# Altium footprint library IC_SMD_QUAD.PcbLib: 112 footprints (part 2 of 7)
Each footprint in its own frame and in the unit in brackets; x right, y up, seen from the top. Pads: shape width x height; smd on the part's side, far side on the other; paste and mask are expansions set on the pad; w line width, h text height; cw(c..) or ccw(c..) is an arc to the next point about the centre after c.
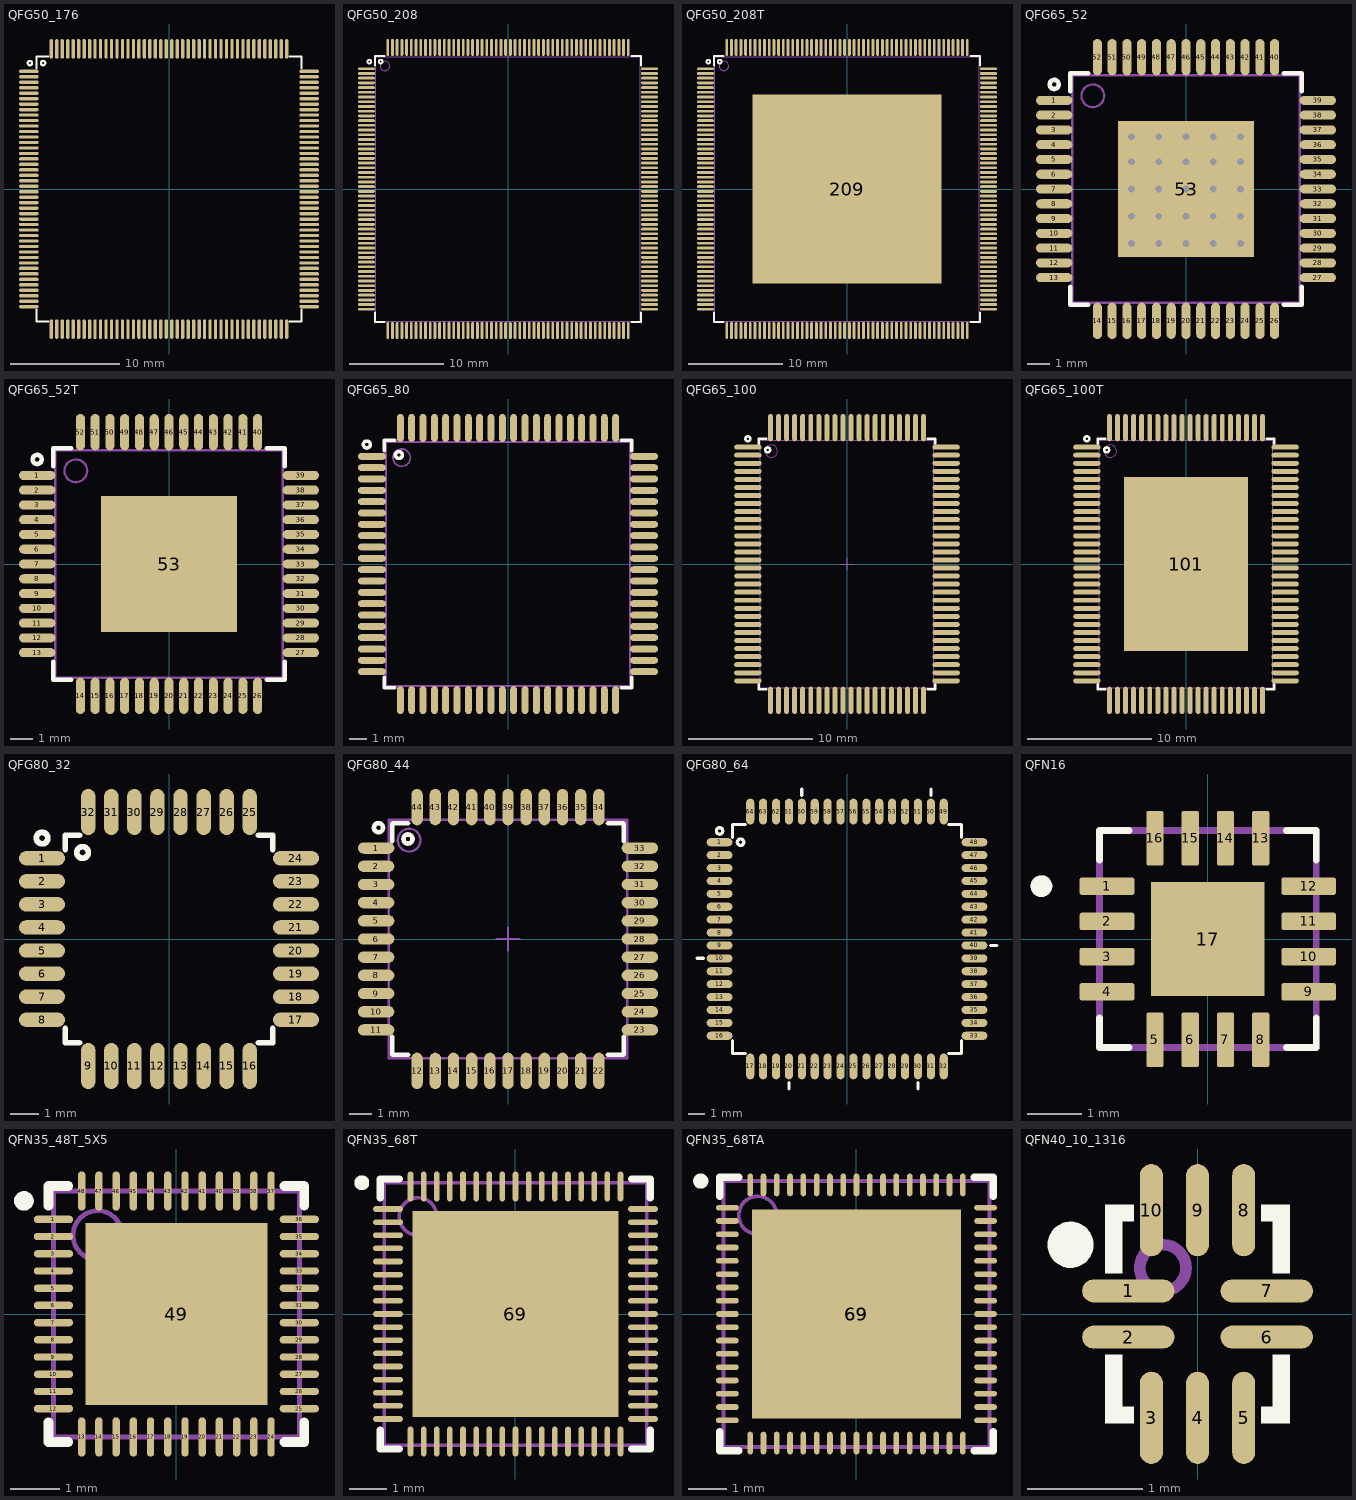
[diagram p1: the footprints below, top view; thin cyan lines are the x and y axes]

## QFG50_176 [mm] "PQFP176, HT176/TQ176 (Xilinx), 24X24mm, Pitch: 0.5mm, HTG176"
pads (176):
  oval 1.8x0.3 smd mask+0.075: 1(-12.8,10.75) 2(-12.8,10.25) 3(-12.8,9.75) 4(-12.8,9.25) 5(-12.8,8.75) 6(-12.8,8.25) 7(-12.8,7.75) 8(-12.8,7.25) 9(-12.8,6.75) 10(-12.8,6.25) 11(-12.8,5.75) 12(-12.8,5.25) 13(-12.8,4.75) 14(-12.8,4.25) 15(-12.8,3.75) 16(-12.8,3.25) 17(-12.8,2.75) 18(-12.8,2.25) 19(-12.8,1.75) 20(-12.8,1.25) 21(-12.8,0.75) 22(-12.8,0.25) 23(-12.8,-0.25) 24(-12.8,-0.75) 25(-12.8,-1.25) 26(-12.8,-1.75) 27(-12.8,-2.25) 28(-12.8,-2.75) 29(-12.8,-3.25) 30(-12.8,-3.75) 31(-12.8,-4.25) 32(-12.8,-4.75) 33(-12.8,-5.25) 34(-12.8,-5.75) 35(-12.8,-6.25) 36(-12.8,-6.75) 37(-12.8,-7.25) 38(-12.8,-7.75) 39(-12.8,-8.25) 40(-12.8,-8.75) 41(-12.8,-9.25) 42(-12.8,-9.75) 43(-12.8,-10.25) 44(-12.8,-10.75) 89(12.8,-10.75) 90(12.8,-10.25) 91(12.8,-9.75) 92(12.8,-9.25) 93(12.8,-8.75) 94(12.8,-8.25) 95(12.8,-7.75) 96(12.8,-7.25) 97(12.8,-6.75) 98(12.8,-6.25) 99(12.8,-5.75) 100(12.8,-5.25) 101(12.8,-4.75) 102(12.8,-4.25) 103(12.8,-3.75) 104(12.8,-3.25) 105(12.8,-2.75) 106(12.8,-2.25) 107(12.8,-1.75) 108(12.8,-1.25) 109(12.8,-0.75) 110(12.8,-0.25) 111(12.8,0.25) 112(12.8,0.75) 113(12.8,1.25) 114(12.8,1.75) 115(12.8,2.25) 116(12.8,2.75) 117(12.8,3.25) 118(12.8,3.75) 119(12.8,4.25) 120(12.8,4.75) 121(12.8,5.25) 122(12.8,5.75) 123(12.8,6.25) 124(12.8,6.75) 125(12.8,7.25) 126(12.8,7.75) 127(12.8,8.25) 128(12.8,8.75) 129(12.8,9.25) 130(12.8,9.75) 131(12.8,10.25) 132(12.8,10.75)
  oval 0.3x1.8 smd mask+0.075: 45(-10.75,-12.8) 46(-10.25,-12.8) 47(-9.75,-12.8) 48(-9.25,-12.8) 49(-8.75,-12.8) 50(-8.25,-12.8) 51(-7.75,-12.8) 52(-7.25,-12.8) 53(-6.75,-12.8) 54(-6.25,-12.8) 55(-5.75,-12.8) 56(-5.25,-12.8) 57(-4.75,-12.8) 58(-4.25,-12.8) 59(-3.75,-12.8) 60(-3.25,-12.8) 61(-2.75,-12.8) 62(-2.25,-12.8) 63(-1.75,-12.8) 64(-1.25,-12.8) 65(-0.75,-12.8) 66(-0.25,-12.8) 67(0.25,-12.8) 68(0.75,-12.8) 69(1.25,-12.8) 70(1.75,-12.8) 71(2.25,-12.8) 72(2.75,-12.8) 73(3.25,-12.8) 74(3.75,-12.8) 75(4.25,-12.8) 76(4.75,-12.8) 77(5.25,-12.8) 78(5.75,-12.8) 79(6.25,-12.8) 80(6.75,-12.8) 81(7.25,-12.8) 82(7.75,-12.8) 83(8.25,-12.8) 84(8.75,-12.8) 85(9.25,-12.8) 86(9.75,-12.8) 87(10.25,-12.8) 88(10.75,-12.8) 133(10.75,12.8) 134(10.25,12.8) 135(9.75,12.8) 136(9.25,12.8) 137(8.75,12.8) 138(8.25,12.8) 139(7.75,12.8) 140(7.25,12.8) 141(6.75,12.8) 142(6.25,12.8) 143(5.75,12.8) 144(5.25,12.8) 145(4.75,12.8) 146(4.25,12.8) 147(3.75,12.8) 148(3.25,12.8) 149(2.75,12.8) 150(2.25,12.8) 151(1.75,12.8) 152(1.25,12.8) 153(0.75,12.8) 154(0.25,12.8) 155(-0.25,12.8) 156(-0.75,12.8) 157(-1.25,12.8) 158(-1.75,12.8) 159(-2.25,12.8) 160(-2.75,12.8) 161(-3.25,12.8) 162(-3.75,12.8) 163(-4.25,12.8) 164(-4.75,12.8) 165(-5.25,12.8) 166(-5.75,12.8) 167(-6.25,12.8) 168(-6.75,12.8) 169(-7.25,12.8) 170(-7.75,12.8) 171(-8.25,12.8) 172(-8.75,12.8) 173(-9.25,12.8) 174(-9.75,12.8) 175(-10.25,12.8) 176(-10.75,12.8)
Top Overlay:
  circle w0.2: c-12.7,11.5 r0.2
  circle w0.2: c-11.5,11.5 r0.2
  lines w0.2: -12.1,-11 -12.1,-12.1 -11,-12.1 ; -12.1,11 -12.1,12.1 -11,12.1 ; 11,-12.1 12.1,-12.1 12.1,-11 ; 11,12.1 12.1,12.1 12.1,11
Top Designator:
  text ".Designator" at -3.71,-0.344 h1.52
3D body "User Library-pqfp-176-0_5.step": height 1.6, standoff 0, extent -13.1,-13.119 13.1,13.081

## QFG50_208 [mm] "LQFP208, pqfp208 (Altera), N208 (Cypress), HQ208/MQ208/PQ208/PQG208 (Xilinx), MS-029FA1(JEDEC), SOT459-1, 28X28mm, Pitch: 0.5mm"
pads (208):
  oval 1.8x0.3 smd mask+0.075: 1(-15,12.75) 2(-15,12.25) 3(-15,11.75) 4(-15,11.25) 5(-15,10.75) 6(-15,10.25) 7(-15,9.75) 8(-15,9.25) 9(-15,8.75) 10(-15,8.25) 11(-15,7.75) 12(-15,7.25) 13(-15,6.75) 14(-15,6.25) 15(-15,5.75) 16(-15,5.25) 17(-15,4.75) 18(-15,4.25) 19(-15,3.75) 20(-15,3.25) 21(-15,2.75) 22(-15,2.25) 23(-15,1.75) 24(-15,1.25) 25(-15,0.75) 26(-15,0.25) 27(-15,-0.25) 28(-15,-0.75) 29(-15,-1.25) 30(-15,-1.75) 31(-15,-2.25) 32(-15,-2.75) 33(-15,-3.25) 34(-15,-3.75) 35(-15,-4.25) 36(-15,-4.75) 37(-15,-5.25) 38(-15,-5.75) 39(-15,-6.25) 40(-15,-6.75) 41(-15,-7.25) 42(-15,-7.75) 43(-15,-8.25) 44(-15,-8.75) 45(-15,-9.25) 46(-15,-9.75) 47(-15,-10.25) 48(-15,-10.75) 49(-15,-11.25) 50(-15,-11.75) 51(-15,-12.25) 52(-15,-12.75) 105(15,-12.75) 106(15,-12.25) 107(15,-11.75) 108(15,-11.25) 109(15,-10.75) 110(15,-10.25) 111(15,-9.75) 112(15,-9.25) 113(15,-8.75) 114(15,-8.25) 115(15,-7.75) 116(15,-7.25) 117(15,-6.75) 118(15,-6.25) 119(15,-5.75) 120(15,-5.25) 121(15,-4.75) 122(15,-4.25) 123(15,-3.75) 124(15,-3.25) 125(15,-2.75) 126(15,-2.25) 127(15,-1.75) 128(15,-1.25) 129(15,-0.75) 130(15,-0.25) 131(15,0.25) 132(15,0.75) 133(15,1.25) 134(15,1.75) 135(15,2.25) 136(15,2.75) 137(15,3.25) 138(15,3.75) 139(15,4.25) 140(15,4.75) 141(15,5.25) 142(15,5.75) 143(15,6.25) 144(15,6.75) 145(15,7.25) 146(15,7.75) 147(15,8.25) 148(15,8.75) 149(15,9.25) 150(15,9.75) 151(15,10.25) 152(15,10.75) 153(15,11.25) 154(15,11.75) 155(15,12.25) 156(15,12.75)
  oval 0.3x1.8 smd mask+0.075: 53(-12.75,-15) 54(-12.25,-15) 55(-11.75,-15) 56(-11.25,-15) 57(-10.75,-15) 58(-10.25,-15) 59(-9.75,-15) 60(-9.25,-15) 61(-8.75,-15) 62(-8.25,-15) 63(-7.75,-15) 64(-7.25,-15) 65(-6.75,-15) 66(-6.25,-15) 67(-5.75,-15) 68(-5.25,-15) 69(-4.75,-15) 70(-4.25,-15) 71(-3.75,-15) 72(-3.25,-15) 73(-2.75,-15) 74(-2.25,-15) 75(-1.75,-15) 76(-1.25,-15) 77(-0.75,-15) 78(-0.25,-15) 79(0.25,-15) 80(0.75,-15) 81(1.25,-15) 82(1.75,-15) 83(2.25,-15) 84(2.75,-15) 85(3.25,-15) 86(3.75,-15) 87(4.25,-15) 88(4.75,-15) 89(5.25,-15) 90(5.75,-15) 91(6.25,-15) 92(6.75,-15) 93(7.25,-15) 94(7.75,-15) 95(8.25,-15) 96(8.75,-15) 97(9.25,-15) 98(9.75,-15) 99(10.25,-15) 100(10.75,-15) 101(11.25,-15) 102(11.75,-15) 103(12.25,-15) 104(12.75,-15) 157(12.75,15) 158(12.25,15) 159(11.75,15) 160(11.25,15) 161(10.75,15) 162(10.25,15) 163(9.75,15) 164(9.25,15) 165(8.75,15) 166(8.25,15) 167(7.75,15) 168(7.25,15) 169(6.75,15) 170(6.25,15) 171(5.75,15) 172(5.25,15) 173(4.75,15) 174(4.25,15) 175(3.75,15) 176(3.25,15) 177(2.75,15) 178(2.25,15) 179(1.75,15) 180(1.25,15) 181(0.75,15) 182(0.25,15) 183(-0.25,15) 184(-0.75,15) 185(-1.25,15) 186(-1.75,15) 187(-2.25,15) 188(-2.75,15) 189(-3.25,15) 190(-3.75,15) 191(-4.25,15) 192(-4.75,15) 193(-5.25,15) 194(-5.75,15) 195(-6.25,15) 196(-6.75,15) 197(-7.25,15) 198(-7.75,15) 199(-8.25,15) 200(-8.75,15) 201(-9.25,15) 202(-9.75,15) 203(-10.25,15) 204(-10.75,15) 205(-11.25,15) 206(-11.75,15) 207(-12.25,15) 208(-12.75,15)
Top Overlay:
  circle w0.2: c-13.5,13.5 r0.2
  circle w0.2: c-14.7,13.5 r0.2
  lines w0.2: -14.1,-13.1 -14.1,-14.1 -13.1,-14.1 ; -14.1,13.1 -14.1,14.1 -13.1,14.1 ; 13.1,-14.1 14.1,-14.1 14.1,-13.1 ; 13.1,14.1 14.1,14.1 14.1,13.1
Top Designator:
  text ".Designator" at -3.71,-0.344 h1.52
Mechanical 13:
  circle w0.1: c-13.05,13.05 r0.5
  lines w0.1: -14,-14 -14,14 14,14 14,-14 -14,-14
3D body "SW3dPS-PQ208.STEP": height 4.15, standoff -0.08, extent -15.3,-15.3 15.3,15.3

## QFG50_208T [mm] "LQFP208p, PYP, HQ208, MS-026(JEDEC), 28X28mm, ptich: 0.5mm"
pads (209):
  oval 1.8x0.3 smd mask+0.075: 1(-15,12.75) 2(-15,12.25) 3(-15,11.75) 4(-15,11.25) 5(-15,10.75) 6(-15,10.25) 7(-15,9.75) 8(-15,9.25) 9(-15,8.75) 10(-15,8.25) 11(-15,7.75) 12(-15,7.25) 13(-15,6.75) 14(-15,6.25) 15(-15,5.75) 16(-15,5.25) 17(-15,4.75) 18(-15,4.25) 19(-15,3.75) 20(-15,3.25) 21(-15,2.75) 22(-15,2.25) 23(-15,1.75) 24(-15,1.25) 25(-15,0.75) 26(-15,0.25) 27(-15,-0.25) 28(-15,-0.75) 29(-15,-1.25) 30(-15,-1.75) 31(-15,-2.25) 32(-15,-2.75) 33(-15,-3.25) 34(-15,-3.75) 35(-15,-4.25) 36(-15,-4.75) 37(-15,-5.25) 38(-15,-5.75) 39(-15,-6.25) 40(-15,-6.75) 41(-15,-7.25) 42(-15,-7.75) 43(-15,-8.25) 44(-15,-8.75) 45(-15,-9.25) 46(-15,-9.75) 47(-15,-10.25) 48(-15,-10.75) 49(-15,-11.25) 50(-15,-11.75) 51(-15,-12.25) 52(-15,-12.75) 105(15,-12.75) 106(15,-12.25) 107(15,-11.75) 108(15,-11.25) 109(15,-10.75) 110(15,-10.25) 111(15,-9.75) 112(15,-9.25) 113(15,-8.75) 114(15,-8.25) 115(15,-7.75) 116(15,-7.25) 117(15,-6.75) 118(15,-6.25) 119(15,-5.75) 120(15,-5.25) 121(15,-4.75) 122(15,-4.25) 123(15,-3.75) 124(15,-3.25) 125(15,-2.75) 126(15,-2.25) 127(15,-1.75) 128(15,-1.25) 129(15,-0.75) 130(15,-0.25) 131(15,0.25) 132(15,0.75) 133(15,1.25) 134(15,1.75) 135(15,2.25) 136(15,2.75) 137(15,3.25) 138(15,3.75) 139(15,4.25) 140(15,4.75) 141(15,5.25) 142(15,5.75) 143(15,6.25) 144(15,6.75) 145(15,7.25) 146(15,7.75) 147(15,8.25) 148(15,8.75) 149(15,9.25) 150(15,9.75) 151(15,10.25) 152(15,10.75) 153(15,11.25) 154(15,11.75) 155(15,12.25) 156(15,12.75)
  oval 0.3x1.8 smd mask+0.075: 53(-12.75,-15) 54(-12.25,-15) 55(-11.75,-15) 56(-11.25,-15) 57(-10.75,-15) 58(-10.25,-15) 59(-9.75,-15) 60(-9.25,-15) 61(-8.75,-15) 62(-8.25,-15) 63(-7.75,-15) 64(-7.25,-15) 65(-6.75,-15) 66(-6.25,-15) 67(-5.75,-15) 68(-5.25,-15) 69(-4.75,-15) 70(-4.25,-15) 71(-3.75,-15) 72(-3.25,-15) 73(-2.75,-15) 74(-2.25,-15) 75(-1.75,-15) 76(-1.25,-15) 77(-0.75,-15) 78(-0.25,-15) 79(0.25,-15) 80(0.75,-15) 81(1.25,-15) 82(1.75,-15) 83(2.25,-15) 84(2.75,-15) 85(3.25,-15) 86(3.75,-15) 87(4.25,-15) 88(4.75,-15) 89(5.25,-15) 90(5.75,-15) 91(6.25,-15) 92(6.75,-15) 93(7.25,-15) 94(7.75,-15) 95(8.25,-15) 96(8.75,-15) 97(9.25,-15) 98(9.75,-15) 99(10.25,-15) 100(10.75,-15) 101(11.25,-15) 102(11.75,-15) 103(12.25,-15) 104(12.75,-15) 157(12.75,15) 158(12.25,15) 159(11.75,15) 160(11.25,15) 161(10.75,15) 162(10.25,15) 163(9.75,15) 164(9.25,15) 165(8.75,15) 166(8.25,15) 167(7.75,15) 168(7.25,15) 169(6.75,15) 170(6.25,15) 171(5.75,15) 172(5.25,15) 173(4.75,15) 174(4.25,15) 175(3.75,15) 176(3.25,15) 177(2.75,15) 178(2.25,15) 179(1.75,15) 180(1.25,15) 181(0.75,15) 182(0.25,15) 183(-0.25,15) 184(-0.75,15) 185(-1.25,15) 186(-1.75,15) 187(-2.25,15) 188(-2.75,15) 189(-3.25,15) 190(-3.75,15) 191(-4.25,15) 192(-4.75,15) 193(-5.25,15) 194(-5.75,15) 195(-6.25,15) 196(-6.75,15) 197(-7.25,15) 198(-7.75,15) 199(-8.25,15) 200(-8.75,15) 201(-9.25,15) 202(-9.75,15) 203(-10.25,15) 204(-10.75,15) 205(-11.25,15) 206(-11.75,15) 207(-12.25,15) 208(-12.75,15)
  rect 20x20 smd paste-10 mask+0.1: 209(0,0)
Top Overlay:
  circle w0.2: c-13.5,13.5 r0.2
  circle w0.2: c-14.7,13.5 r0.2
  lines w0.2: -14.1,-13.1 -14.1,-14.1 -13.1,-14.1 ; -14.1,13.1 -14.1,14.1 -13.1,14.1 ; 13.1,-14.1 14.1,-14.1 14.1,-13.1 ; 13.1,14.1 14.1,14.1 14.1,13.1
Top Paste:
  region: 1.6,-0.2 0.2,-0.2 0.2,-1.6 1.6,-1.6
  region: 3.4,-2 2,-2 2,-3.4 3.4,-3.4
  rectangle: 0.2,-3.4 1.6,-2
  region: 3.4,-0.2 2,-0.2 2,-1.6 3.4,-1.6
  rectangle: -3.4,-1.6 -2,-0.2
  region: -0.2,-2 -1.6,-2 -1.6,-3.4 -0.2,-3.4
  rectangle: -3.4,-3.4 -2,-2
  rectangle: -1.6,-1.6 -0.2,-0.2
  rectangle: -5.2,-3.4 -3.8,-2
  rectangle: -5.2,-1.6 -3.8,-0.2
  region: 5.2,-2 3.8,-2 3.8,-3.4 5.2,-3.4
  region: 5.2,-0.2 3.8,-0.2 3.8,-1.6 5.2,-1.6
  region: 5.2,-3.8 3.8,-3.8 3.8,-5.2 5.2,-5.2
  rectangle: -5.2,-5.2 -3.8,-3.8
  rectangle: -3.4,-5.2 -2,-3.8
  region: -0.2,-3.8 -1.6,-3.8 -1.6,-5.2 -0.2,-5.2
  rectangle: 0.2,-5.2 1.6,-3.8
  region: 3.4,-3.8 2,-3.8 2,-5.2 3.4,-5.2
  region: 3.4,-7.4 2,-7.4 2,-8.8 3.4,-8.8
  rectangle: 0.2,-8.8 1.6,-7.4
  region: -0.2,-7.4 -1.6,-7.4 -1.6,-8.8 -0.2,-8.8
  rectangle: -3.4,-8.8 -2,-7.4
  rectangle: -5.2,-8.8 -3.8,-7.4
  region: 5.2,-7.4 3.8,-7.4 3.8,-8.8 5.2,-8.8
  region: 5.2,-5.6 3.8,-5.6 3.8,-7 5.2,-7
  rectangle: -5.2,-7 -3.8,-5.6
  rectangle: -3.4,-7 -2,-5.6
  region: -0.2,-5.6 -1.6,-5.6 -1.6,-7 -0.2,-7
  rectangle: 0.2,-7 1.6,-5.6
  region: 3.4,-5.6 2,-5.6 2,-7 3.4,-7
  rectangle: -7,-7 -5.6,-5.6
  rectangle: -8.8,-7 -7.4,-5.6
  rectangle: -8.8,-8.8 -7.4,-7.4
  rectangle: -7,-8.8 -5.6,-7.4
  rectangle: -7,-5.2 -5.6,-3.8
  rectangle: -8.8,-5.2 -7.4,-3.8
  rectangle: -8.8,-1.6 -7.4,-0.2
  rectangle: -8.8,-3.4 -7.4,-2
  rectangle: -7,-3.4 -5.6,-2
  rectangle: -7,-1.6 -5.6,-0.2
  region: 7,-5.6 5.6,-5.6 5.6,-7 7,-7
  region: 8.8,-5.6 7.4,-5.6 7.4,-7 8.8,-7
  region: 8.8,-7.4 7.4,-7.4 7.4,-8.8 8.8,-8.8
  region: 7,-7.4 5.6,-7.4 5.6,-8.8 7,-8.8
  region: 7,-3.8 5.6,-3.8 5.6,-5.2 7,-5.2
  region: 8.8,-3.8 7.4,-3.8 7.4,-5.2 8.8,-5.2
  region: 8.8,-0.2 7.4,-0.2 7.4,-1.6 8.8,-1.6
  region: 8.8,-2 7.4,-2 7.4,-3.4 8.8,-3.4
  region: 7,-2 5.6,-2 5.6,-3.4 7,-3.4
  region: 7,-0.2 5.6,-0.2 5.6,-1.6 7,-1.6
  region: 7,1.6 5.6,1.6 5.6,0.2 7,0.2
  region: 7,3.4 5.6,3.4 5.6,2 7,2
  region: 8.8,3.4 7.4,3.4 7.4,2 8.8,2
  region: 8.8,1.6 7.4,1.6 7.4,0.2 8.8,0.2
  region: 8.8,5.2 7.4,5.2 7.4,3.8 8.8,3.8
  region: 7,5.2 5.6,5.2 5.6,3.8 7,3.8
  region: 7,8.8 5.6,8.8 5.6,7.4 7,7.4
  region: 8.8,8.8 7.4,8.8 7.4,7.4 8.8,7.4
  region: 8.8,7 7.4,7 7.4,5.6 8.8,5.6
  region: 7,7 5.6,7 5.6,5.6 7,5.6
  rectangle: -7,0.2 -5.6,1.6
  rectangle: -7,2 -5.6,3.4
  rectangle: -8.8,2 -7.4,3.4
  rectangle: -8.8,0.2 -7.4,1.6
  rectangle: -8.8,3.8 -7.4,5.2
  rectangle: -7,3.8 -5.6,5.2
  rectangle: -7,7.4 -5.6,8.8
  rectangle: -8.8,7.4 -7.4,8.8
  rectangle: -8.8,5.6 -7.4,7
  rectangle: -7,5.6 -5.6,7
  region: 3.4,7 2,7 2,5.6 3.4,5.6
  rectangle: 0.2,5.6 1.6,7
  region: -0.2,7 -1.6,7 -1.6,5.6 -0.2,5.6
  rectangle: -3.4,5.6 -2,7
  rectangle: -5.2,5.6 -3.8,7
  region: 5.2,7 3.8,7 3.8,5.6 5.2,5.6
  region: 5.2,8.8 3.8,8.8 3.8,7.4 5.2,7.4
  rectangle: -5.2,7.4 -3.8,8.8
  rectangle: -3.4,7.4 -2,8.8
  region: -0.2,8.8 -1.6,8.8 -1.6,7.4 -0.2,7.4
  rectangle: 0.2,7.4 1.6,8.8
  region: 3.4,8.8 2,8.8 2,7.4 3.4,7.4
  region: 3.4,5.2 2,5.2 2,3.8 3.4,3.8
  rectangle: 0.2,3.8 1.6,5.2
  region: -0.2,5.2 -1.6,5.2 -1.6,3.8 -0.2,3.8
  rectangle: -3.4,3.8 -2,5.2
  rectangle: -5.2,3.8 -3.8,5.2
  region: 5.2,5.2 3.8,5.2 3.8,3.8 5.2,3.8
  region: 5.2,1.6 3.8,1.6 3.8,0.2 5.2,0.2
  region: 5.2,3.4 3.8,3.4 3.8,2 5.2,2
  rectangle: -5.2,0.2 -3.8,1.6
  rectangle: -5.2,2 -3.8,3.4
  rectangle: -1.6,0.2 -0.2,1.6
  rectangle: -3.4,2 -2,3.4
  region: -0.2,3.4 -1.6,3.4 -1.6,2 -0.2,2
  rectangle: -3.4,0.2 -2,1.6
  region: 3.4,1.6 2,1.6 2,0.2 3.4,0.2
  rectangle: 0.2,2 1.6,3.4
  region: 3.4,3.4 2,3.4 2,2 3.4,2
  region: 1.6,1.6 0.2,1.6 0.2,0.2 1.6,0.2
Top Solder:
  drawing of 169 lines, arcs and shapes, not listed
Top Designator:
  text ".Designator" at -3.71,-0.344 h1.52
Mechanical 13:
  circle w0.1: c-13.05,13.05 r0.5
  lines w0.1: -14,-14 -14,14 14,14 14,-14 -14,-14
3D body: height 1.6, standoff 0.05, extent -14,-14 14,14

## QFG65_52 [mm] "MQFP52, S-52-2 (analog-Device), MO-112-AC-1(JEDEC), 52-Leads, Body 10x10mm, Pitch 0.65mm"
height 1.6
pads (53):
  oval 1.6x0.4 smd mask+0.075: 1(-5.8,3.9) 2(-5.8,3.25) 3(-5.8,2.6) 4(-5.8,1.95) 5(-5.8,1.3) 6(-5.8,0.65) 7(-5.8,0) 8(-5.8,-0.65) 9(-5.8,-1.3) 10(-5.8,-1.95) 11(-5.8,-2.6) 12(-5.8,-3.25) 13(-5.8,-3.9) 27(5.8,-3.9) 28(5.8,-3.25) 29(5.8,-2.6) 30(5.8,-1.95) 31(5.8,-1.3) 32(5.8,-0.65) 33(5.8,0) 34(5.8,0.65) 35(5.8,1.3) 36(5.8,1.95) 37(5.8,2.6) 38(5.8,3.25) 39(5.8,3.9)
  oval 0.4x1.6 smd mask+0.075: 14(-3.9,-5.8) 15(-3.25,-5.8) 16(-2.6,-5.8) 17(-1.95,-5.8) 18(-1.3,-5.8) 19(-0.65,-5.8) 20(0,-5.8) 21(0.65,-5.8) 22(1.3,-5.8) 23(1.95,-5.8) 24(2.6,-5.8) 25(3.25,-5.8) 26(3.9,-5.8) 40(3.9,5.8) 41(3.25,5.8) 42(2.6,5.8) 43(1.95,5.8) 44(1.3,5.8) 45(0.65,5.8) 46(0,5.8) 47(-0.65,5.8) 48(-1.3,5.8) 49(-1.95,5.8) 50(-2.6,5.8) 51(-3.25,5.8) 52(-3.9,5.8)
  rect 6x6 smd: 53(0,0)
via 2.4,-2.4 diameter 0.5 hole 0.3
via 1.2,-2.4 diameter 0.5 hole 0.3
via 0,-2.4 diameter 0.5 hole 0.3
via -1.2,-2.4 diameter 0.5 hole 0.3
via -2.4,-2.4 diameter 0.5 hole 0.3
via 2.4,-1.2 diameter 0.5 hole 0.3
via 1.2,-1.2 diameter 0.5 hole 0.3
via 0,-1.2 diameter 0.5 hole 0.3
via -1.2,-1.2 diameter 0.5 hole 0.3
via -2.4,-1.2 diameter 0.5 hole 0.3
via 2.4,0 diameter 0.5 hole 0.3
via 1.2,0 diameter 0.5 hole 0.3
via 0,0 diameter 0.5 hole 0.3
via -1.2,0 diameter 0.5 hole 0.3
via -2.4,0 diameter 0.5 hole 0.3
via 2.4,1.2 diameter 0.5 hole 0.3
via 1.2,1.2 diameter 0.5 hole 0.3
via 0,1.2 diameter 0.5 hole 0.3
via -1.2,1.2 diameter 0.5 hole 0.3
via -2.4,1.2 diameter 0.5 hole 0.3
via 2.4,2.3 diameter 0.5 hole 0.3
via 1.2,2.3 diameter 0.5 hole 0.3
via 0,2.3 diameter 0.5 hole 0.3
via -1.2,2.3 diameter 0.5 hole 0.3
via -2.4,2.3 diameter 0.5 hole 0.3
Top Overlay:
  circle w0.2: c-5.8,4.6 r0.2
  lines w0.2: -5.1,-4.3 -5.1,-5.1 -4.3,-5.1 ; -5.1,4.3 -5.1,5.1 -4.3,5.1 ; 4.3,-5.1 5.1,-5.1 5.1,-4.3 ; 4.3,5.1 5.1,5.1 5.1,4.3
Top Designator:
  text ".Designator" at -3.71,-0.344 h1.52
Mechanical 13:
  circle w0.1: c-4.1,4.1 r0.5
  lines w0.1: -5,-5 5,-5 5,5 -5,5 -5,-5
Mechanical 15:
  lines w0.1: -0.5,0 0.5,0 ; 0,-0.5 0,0.5
3D body "QFP127P600-8N.step": height 1.6, standoff 0, extent -6,-6 6,6

## QFG65_52T [mm] "LQFP, TQFP, 52-Leads, Body 10x10mm, Pitch 0.65mm"
height 1.6
pads (53):
  oval 1.6x0.4 smd mask+0.075: 1(-5.8,3.9) 2(-5.8,3.25) 3(-5.8,2.6) 4(-5.8,1.95) 5(-5.8,1.3) 6(-5.8,0.65) 7(-5.8,0) 8(-5.8,-0.65) 9(-5.8,-1.3) 10(-5.8,-1.95) 11(-5.8,-2.6) 12(-5.8,-3.25) 13(-5.8,-3.9) 27(5.8,-3.9) 28(5.8,-3.25) 29(5.8,-2.6) 30(5.8,-1.95) 31(5.8,-1.3) 32(5.8,-0.65) 33(5.8,0) 34(5.8,0.65) 35(5.8,1.3) 36(5.8,1.95) 37(5.8,2.6) 38(5.8,3.25) 39(5.8,3.9)
  oval 0.4x1.6 smd mask+0.075: 14(-3.9,-5.8) 15(-3.25,-5.8) 16(-2.6,-5.8) 17(-1.95,-5.8) 18(-1.3,-5.8) 19(-0.65,-5.8) 20(0,-5.8) 21(0.65,-5.8) 22(1.3,-5.8) 23(1.95,-5.8) 24(2.6,-5.8) 25(3.25,-5.8) 26(3.9,-5.8) 40(3.9,5.8) 41(3.25,5.8) 42(2.6,5.8) 43(1.95,5.8) 44(1.3,5.8) 45(0.65,5.8) 46(0,5.8) 47(-0.65,5.8) 48(-1.3,5.8) 49(-1.95,5.8) 50(-2.6,5.8) 51(-3.25,5.8) 52(-3.9,5.8)
  rect 6x6 smd paste-3: 53(0,0)
Top Overlay:
  circle w0.2: c-5.8,4.6 r0.2
  lines w0.2: -5.1,-4.3 -5.1,-5.1 -4.3,-5.1 ; -5.1,4.3 -5.1,5.1 -4.3,5.1 ; 4.3,-5.1 5.1,-5.1 5.1,-4.3 ; 4.3,5.1 5.1,5.1 5.1,4.3
Top Paste:
  rectangle: -2.6,0.2 -1.6,1.2
  region: -0.2,2.6 -1.2,2.6 -1.2,1.6 -0.2,1.6
  rectangle: -2.6,1.6 -1.6,2.6
  rectangle: -1.2,0.2 -0.2,1.2
  region: 1.2,1.2 0.2,1.2 0.2,0.2 1.2,0.2
  region: 2.6,2.6 1.6,2.6 1.6,1.6 2.6,1.6
  rectangle: 0.2,1.6 1.2,2.6
  region: 2.6,1.2 1.6,1.2 1.6,0.2 2.6,0.2
  region: 2.6,-0.2 1.6,-0.2 1.6,-1.2 2.6,-1.2
  rectangle: 0.2,-2.6 1.2,-1.6
  region: 2.6,-1.6 1.6,-1.6 1.6,-2.6 2.6,-2.6
  region: 1.2,-0.2 0.2,-0.2 0.2,-1.2 1.2,-1.2
  rectangle: -1.2,-1.2 -0.2,-0.2
  rectangle: -2.6,-2.6 -1.6,-1.6
  region: -0.2,-1.6 -1.2,-1.6 -1.2,-2.6 -0.2,-2.6
  rectangle: -2.6,-1.2 -1.6,-0.2
Top Designator:
  text ".Designator" at -3.71,-0.344 h1.52
Mechanical 13:
  circle w0.1: c-4.1,4.1 r0.5
  lines w0.1: -5,-5 5,-5 5,5 -5,5 -5,-5
Mechanical 15:
  lines w0.1: -0.5,0 0.5,0 ; 0,-0.5 0,0.5
3D body "QFP127P600-8N.step": height 1.6, standoff 0, extent -6,-6 6,6

## QFG65_80 [mm] "QFP, 80-Leads, Body 14x14mm (max), Pitch 0.65mm"
height 3
pads (80):
  oval 1.6x0.4 smd mask+0.075: 1(-7.8,6.175) 2(-7.8,5.525) 3(-7.8,4.875) 4(-7.8,4.225) 5(-7.8,3.575) 6(-7.8,2.925) 7(-7.8,2.275) 8(-7.8,1.625) 9(-7.8,0.975) 10(-7.8,0.325) 11(-7.8,-0.325) 12(-7.8,-0.975) 13(-7.8,-1.625) 14(-7.8,-2.275) 15(-7.8,-2.925) 16(-7.8,-3.575) 17(-7.8,-4.225) 18(-7.8,-4.875) 19(-7.8,-5.525) 20(-7.8,-6.175) 41(7.8,-6.175) 42(7.8,-5.525) 43(7.8,-4.875) 44(7.8,-4.225) 45(7.8,-3.575) 46(7.8,-2.925) 47(7.8,-2.275) 48(7.8,-1.625) 49(7.8,-0.975) 50(7.8,-0.325) 51(7.8,0.325) 52(7.8,0.975) 53(7.8,1.625) 54(7.8,2.275) 55(7.8,2.925) 56(7.8,3.575) 57(7.8,4.225) 58(7.8,4.875) 59(7.8,5.525) 60(7.8,6.175)
  oval 0.4x1.6 smd mask+0.075: 21(-6.175,-7.8) 22(-5.525,-7.8) 23(-4.875,-7.8) 24(-4.225,-7.8) 25(-3.575,-7.8) 26(-2.925,-7.8) 27(-2.275,-7.8) 28(-1.625,-7.8) 29(-0.975,-7.8) 30(-0.325,-7.8) 31(0.325,-7.8) 32(0.975,-7.8) 33(1.625,-7.8) 34(2.275,-7.8) 35(2.925,-7.8) 36(3.575,-7.8) 37(4.225,-7.8) 38(4.875,-7.8) 39(5.525,-7.8) 40(6.175,-7.8) 61(6.175,7.8) 62(5.525,7.8) 63(4.875,7.8) 64(4.225,7.8) 65(3.575,7.8) 66(2.925,7.8) 67(2.275,7.8) 68(1.625,7.8) 69(0.975,7.8) 70(0.325,7.8) 71(-0.325,7.8) 72(-0.975,7.8) 73(-1.625,7.8) 74(-2.275,7.8) 75(-2.925,7.8) 76(-3.575,7.8) 77(-4.225,7.8) 78(-4.875,7.8) 79(-5.525,7.8) 80(-6.175,7.8)
Top Overlay:
  circle w0.2: c-6.257,6.25 r0.2
  circle w0.2: c-8.1,6.849 r0.2
  lines w0.2: -7.1,-6.5 -7.1,-7.1 -6.5,-7.1 ; -7.1,6.5 -7.1,7.1 -6.5,7.1 ; 6.5,-7.1 7.1,-7.1 7.1,-6.5 ; 6.5,7.1 7.1,7.1 7.1,6.5
Top Designator:
  text ".Designator" at -3.71,-0.344 h1.52
Mechanical 13:
  circle w0.1: c-6.1,6.1 r0.5
  lines w0.1: -7,-7 -7,7 7,7 7,-7 -7,-7
3D body "QFG65_80-.step": height 1.2, standoff 0, extent -8,-8 8,8

## QFG65_100 [mm] "PQ100, MS-022-GC1(JEDEC), QFP100, 20X14, 0.65mm"
pads (100):
  oval 2.2x0.4 smd mask+0.075: 1(-8,9.425) 2(-8,8.775) 3(-8,8.125) 4(-8,7.475) 5(-8,6.825) 6(-8,6.175) 7(-8,5.525) 8(-8,4.875) 9(-8,4.225) 10(-8,3.575) 11(-8,2.925) 12(-8,2.275) 13(-8,1.625) 14(-8,0.975) 15(-8,0.325) 16(-8,-0.325) 17(-8,-0.975) 18(-8,-1.625) 19(-8,-2.275) 20(-8,-2.925) 21(-8,-3.575) 22(-8,-4.225) 23(-8,-4.875) 24(-8,-5.525) 25(-8,-6.175) 26(-8,-6.825) 27(-8,-7.475) 28(-8,-8.125) 29(-8,-8.775) 30(-8,-9.425) 51(8,-9.425) 52(8,-8.775) 53(8,-8.125) 54(8,-7.475) 55(8,-6.825) 56(8,-6.175) 57(8,-5.525) 58(8,-4.875) 59(8,-4.225) 60(8,-3.575) 61(8,-2.925) 62(8,-2.275) 63(8,-1.625) 64(8,-0.975) 65(8,-0.325) 66(8,0.325) 67(8,0.975) 68(8,1.625) 69(8,2.275) 70(8,2.925) 71(8,3.575) 72(8,4.225) 73(8,4.875) 74(8,5.525) 75(8,6.175) 76(8,6.825) 77(8,7.475) 78(8,8.125) 79(8,8.775) 80(8,9.425)
  oval 0.4x2.2 smd mask+0.075: 31(-6.175,-11) 32(-5.525,-11) 33(-4.875,-11) 34(-4.225,-11) 35(-3.575,-11) 36(-2.925,-11) 37(-2.275,-11) 38(-1.625,-11) 39(-0.975,-11) 40(-0.325,-11) 41(0.325,-11) 42(0.975,-11) 43(1.625,-11) 44(2.275,-11) 45(2.925,-11) 46(3.575,-11) 47(4.225,-11) 48(4.875,-11) 49(5.525,-11) 50(6.175,-11) 81(6.175,11) 82(5.525,11) 83(4.875,11) 84(4.225,11) 85(3.575,11) 86(2.925,11) 87(2.275,11) 88(1.625,11) 89(0.975,11) 90(0.325,11) 91(-0.325,11) 92(-0.975,11) 93(-1.625,11) 94(-2.275,11) 95(-2.925,11) 96(-3.575,11) 97(-4.225,11) 98(-4.875,11) 99(-5.525,11) 100(-6.175,11)
Top Overlay:
  circle w0.2: c-8,10.1 r0.2
  circle w0.2: c-6.4,9.2 r0.2
  lines w0.2: -7.1,-9.7 -7.1,-10.1 -6.5,-10.1 ; -7.1,9.7 -7.1,10.1 -6.5,10.1 ; 6.5,-10.1 7.1,-10.1 7.1,-9.7 ; 6.5,10.1 7.1,10.1 7.1,9.7
Top Designator:
  text ".Designator" at -3.71,-0.344 h1.52
Mechanical 13:
  circle w0.1: c-6.1,9.1 r0.5
  lines w0.1: -7,-10 -7,10 7,10 7,-10 -7,-10
Mechanical 15:
  lines w0.1: -0.5,0 0.5,0 ; 0,-0.5 0,0.5
3D body "QFP127P600-8N.step": height 2.4, standoff 0, extent -8.5,-11.5 8.5,11.5

## QFG65_100T [mm] "HQ100, 20X14, 0.65mm"
pads (101):
  oval 2.2x0.4 smd mask+0.075: 1(-8,9.425) 2(-8,8.775) 3(-8,8.125) 4(-8,7.475) 5(-8,6.825) 6(-8,6.175) 7(-8,5.525) 8(-8,4.875) 9(-8,4.225) 10(-8,3.575) 11(-8,2.925) 12(-8,2.275) 13(-8,1.625) 14(-8,0.975) 15(-8,0.325) 16(-8,-0.325) 17(-8,-0.975) 18(-8,-1.625) 19(-8,-2.275) 20(-8,-2.925) 21(-8,-3.575) 22(-8,-4.225) 23(-8,-4.875) 24(-8,-5.525) 25(-8,-6.175) 26(-8,-6.825) 27(-8,-7.475) 28(-8,-8.125) 29(-8,-8.775) 30(-8,-9.425) 51(8,-9.425) 52(8,-8.775) 53(8,-8.125) 54(8,-7.475) 55(8,-6.825) 56(8,-6.175) 57(8,-5.525) 58(8,-4.875) 59(8,-4.225) 60(8,-3.575) 61(8,-2.925) 62(8,-2.275) 63(8,-1.625) 64(8,-0.975) 65(8,-0.325) 66(8,0.325) 67(8,0.975) 68(8,1.625) 69(8,2.275) 70(8,2.925) 71(8,3.575) 72(8,4.225) 73(8,4.875) 74(8,5.525) 75(8,6.175) 76(8,6.825) 77(8,7.475) 78(8,8.125) 79(8,8.775) 80(8,9.425)
  oval 0.4x2.2 smd mask+0.075: 31(-6.175,-11) 32(-5.525,-11) 33(-4.875,-11) 34(-4.225,-11) 35(-3.575,-11) 36(-2.925,-11) 37(-2.275,-11) 38(-1.625,-11) 39(-0.975,-11) 40(-0.325,-11) 41(0.325,-11) 42(0.975,-11) 43(1.625,-11) 44(2.275,-11) 45(2.925,-11) 46(3.575,-11) 47(4.225,-11) 48(4.875,-11) 49(5.525,-11) 50(6.175,-11) 81(6.175,11) 82(5.525,11) 83(4.875,11) 84(4.225,11) 85(3.575,11) 86(2.925,11) 87(2.275,11) 88(1.625,11) 89(0.975,11) 90(0.325,11) 91(-0.325,11) 92(-0.975,11) 93(-1.625,11) 94(-2.275,11) 95(-2.925,11) 96(-3.575,11) 97(-4.225,11) 98(-4.875,11) 99(-5.525,11) 100(-6.175,11)
  rect 10x14 smd paste-10 mask+0.075: 101(0,0)
Top Overlay:
  circle w0.2: c-8,10.1 r0.2
  circle w0.2: c-6.4,9.2 r0.2
  lines w0.2: -7.1,-9.7 -7.1,-10.1 -6.5,-10.1 ; -7.1,9.7 -7.1,10.1 -6.5,10.1 ; 6.5,-10.1 7.1,-10.1 7.1,-9.7 ; 6.5,10.1 7.1,10.1 7.1,9.7
Top Paste:
  region: 2.6,-0.2 1.6,-0.2 1.6,-1.2 2.6,-1.2
  rectangle: 0.2,-2.6 1.2,-1.6
  region: 2.6,-1.6 1.6,-1.6 1.6,-2.6 2.6,-2.6
  region: 1.2,-0.2 0.2,-0.2 0.2,-1.2 1.2,-1.2
  rectangle: -1.2,-1.2 -0.2,-0.2
  rectangle: -2.6,-2.6 -1.6,-1.6
  region: -0.2,-1.6 -1.2,-1.6 -1.2,-2.6 -0.2,-2.6
  rectangle: -2.6,-1.2 -1.6,-0.2
  rectangle: -4.6,-2.6 -3,-1.6
  rectangle: -4.6,-1.2 -3,-0.2
  region: 4.6,-0.2 3,-0.2 3,-1.2 4.6,-1.2
  region: 4.6,-1.6 3,-1.6 3,-2.6 4.6,-2.6
  region: 4.6,-3 3,-3 3,-4 4.6,-4
  rectangle: -4.6,-4 -3,-3
  region: -0.2,-3 -1.2,-3 -1.2,-4 -0.2,-4
  rectangle: -2.6,-4 -1.6,-3
  region: 2.6,-3 1.6,-3 1.6,-4 2.6,-4
  rectangle: 0.2,-4 1.2,-3
  region: 4.6,-4.4 3,-4.4 3,-5.4 4.6,-5.4
  rectangle: -4.6,-5.4 -3,-4.4
  region: -0.2,-4.4 -1.2,-4.4 -1.2,-5.4 -0.2,-5.4
  rectangle: -2.6,-5.4 -1.6,-4.4
  region: 2.6,-4.4 1.6,-4.4 1.6,-5.4 2.6,-5.4
  rectangle: 0.2,-5.4 1.2,-4.4
  region: 4.6,-5.8 3,-5.8 3,-6.8 4.6,-6.8
  rectangle: -4.6,-6.8 -3,-5.8
  region: -0.2,-5.8 -1.2,-5.8 -1.2,-6.8 -0.2,-6.8
  rectangle: -2.6,-6.8 -1.6,-5.8
  region: 2.6,-5.8 1.6,-5.8 1.6,-6.8 2.6,-6.8
  rectangle: 0.2,-6.8 1.2,-5.8
  rectangle: 0.2,5.8 1.2,6.8
  region: 2.6,6.8 1.6,6.8 1.6,5.8 2.6,5.8
  rectangle: -2.6,5.8 -1.6,6.8
  region: -0.2,6.8 -1.2,6.8 -1.2,5.8 -0.2,5.8
  rectangle: -4.6,5.8 -3,6.8
  region: 4.6,6.8 3,6.8 3,5.8 4.6,5.8
  rectangle: 0.2,4.4 1.2,5.4
  region: 2.6,5.4 1.6,5.4 1.6,4.4 2.6,4.4
  rectangle: -2.6,4.4 -1.6,5.4
  region: -0.2,5.4 -1.2,5.4 -1.2,4.4 -0.2,4.4
  rectangle: -4.6,4.4 -3,5.4
  region: 4.6,5.4 3,5.4 3,4.4 4.6,4.4
  rectangle: 0.2,3 1.2,4
  region: 2.6,4 1.6,4 1.6,3 2.6,3
  rectangle: -2.6,3 -1.6,4
  region: -0.2,4 -1.2,4 -1.2,3 -0.2,3
  rectangle: -4.6,3 -3,4
  region: 4.6,4 3,4 3,3 4.6,3
  region: 4.6,2.6 3,2.6 3,1.6 4.6,1.6
  region: 4.6,1.2 3,1.2 3,0.2 4.6,0.2
  rectangle: -4.6,0.2 -3,1.2
  rectangle: -4.6,1.6 -3,2.6
  rectangle: -2.6,0.2 -1.6,1.2
  region: -0.2,2.6 -1.2,2.6 -1.2,1.6 -0.2,1.6
  rectangle: -2.6,1.6 -1.6,2.6
  rectangle: -1.2,0.2 -0.2,1.2
  region: 1.2,1.2 0.2,1.2 0.2,0.2 1.2,0.2
  region: 2.6,2.6 1.6,2.6 1.6,1.6 2.6,1.6
  rectangle: 0.2,1.6 1.2,2.6
  region: 2.6,1.2 1.6,1.2 1.6,0.2 2.6,0.2
Top Designator:
  text ".Designator" at -3.71,-0.344 h1.52
Mechanical 13:
  circle w0.1: c-6.1,9.1 r0.5
  lines w0.1: -7,-10 -7,10 7,10 7,-10 -7,-10
Mechanical 15:
  lines w0.1: -0.5,0 0.5,0 ; 0,-0.5 0,0.5
3D body "QFP127P600-8N.step": height 2.4, standoff 0, extent -8.5,-11.5 8.5,11.5

## QFG80_32 [mm] "TQFP32, A32 (Cypress), GP32 (Zarlink), MS-026ABA(JEDEC), 7X7mm, 0.8mm"
pads (32):
  oval 1.6x0.5 smd: 1(-4.4,2.8) 2(-4.4,2) 3(-4.4,1.2) 4(-4.4,0.4) 5(-4.4,-0.4) 6(-4.4,-1.2) 7(-4.4,-2) 8(-4.4,-2.8) 17(4.4,-2.8) 18(4.4,-2) 19(4.4,-1.2) 20(4.4,-0.4) 21(4.4,0.4) 22(4.4,1.2) 23(4.4,2) 24(4.4,2.8)
  oval 0.5x1.6 smd: 9(-2.8,-4.4) 10(-2,-4.4) 11(-1.2,-4.4) 12(-0.4,-4.4) 13(0.4,-4.4) 14(1.2,-4.4) 15(2,-4.4) 16(2.8,-4.4) 25(2.8,4.4) 26(2,4.4) 27(1.2,4.4) 28(0.4,4.4) 29(-0.4,4.4) 30(-1.2,4.4) 31(-2,4.4) 32(-2.8,4.4)
Top Overlay:
  circle w0.2: c-4.4,3.5 r0.2
  circle w0.2: c-3,3 r0.2
  lines w0.2: -3.6,-3.1 -3.6,-3.6 -3.1,-3.6 ; -3.6,3.1 -3.6,3.6 -3.1,3.6 ; 3.1,-3.6 3.6,-3.6 3.6,-3.1 ; 3.1,3.6 3.6,3.6 3.6,3.1
Top Designator:
  text ".Designator" at -3.71,-0.344 h1.52
3D body "TQFP 32.stp": height 1.2, standoff 0, extent -4.5,-4.5 4.5,4.5

## QFG80_44 [mm] "TQFP44, PQFP44, A44 (Cypress), QFP44/MQFP44N (Dallas), VQ44,VQG44 (Xilinx), MS-026ACB, MS-022AB(JEDEC), 44A, 10X10, 0.8mm"
height 2.3
pads (44):
  oval 1.6x0.5 smd mask+0.075: 1(-5.8,4) 2(-5.8,3.2) 3(-5.8,2.4) 4(-5.8,1.6) 5(-5.8,0.8) 6(-5.8,0) 7(-5.8,-0.8) 8(-5.8,-1.6) 9(-5.8,-2.4) 10(-5.8,-3.2) 11(-5.8,-4) 23(5.8,-4) 24(5.8,-3.2) 25(5.8,-2.4) 26(5.8,-1.6) 27(5.8,-0.8) 28(5.8,0) 29(5.8,0.8) 30(5.8,1.6) 31(5.8,2.4) 32(5.8,3.2) 33(5.8,4)
  oval 0.5x1.6 smd mask+0.075: 12(-4,-5.8) 13(-3.2,-5.8) 14(-2.4,-5.8) 15(-1.6,-5.8) 16(-0.8,-5.8) 17(0,-5.8) 18(0.8,-5.8) 19(1.6,-5.8) 20(2.4,-5.8) 21(3.2,-5.8) 22(4,-5.8) 34(4,5.8) 35(3.2,5.8) 36(2.4,5.8) 37(1.6,5.8) 38(0.8,5.8) 39(0,5.8) 40(-0.8,5.8) 41(-1.6,5.8) 42(-2.4,5.8) 43(-3.2,5.8) 44(-4,5.8)
Top Overlay:
  circle w0.2: c-5.7,4.9 r0.2
  circle w0.2: c-4.4,4.4 r0.2
  lines w0.2: -5.1,-4.3 -5.1,-5.1 -4.4,-5.1 ; -5.1,4.3 -5.1,5.1 -4.4,5.1 ; 4.4,-5.1 5.1,-5.1 5.1,-4.3 ; 4.4,5.1 5.1,5.1 5.1,4.3
Top Designator:
  text ".Designator" at -3.71,-0.344 h1.52
Mechanical 13:
  circle w0.1: c-4.35,4.35 r0.5
  lines w0.1: -5.25,-5.25 -5.25,5.25 5.25,5.25 5.25,-5.25 -5.25,-5.25
Mechanical 15:
  lines w0.1: -0.5,0 0.5,0 ; 0,-0.5 0,0.5
3D body "lqfp44-sot389-1.STEP": height 1.45, standoff -0.06, extent -6.075,-6.038 6,6.038

## QFG80_64 [mm] "TQFP64, N65 (Cypress), , MS-026 AEB(JEDEC), 64A (atmel), 14X14mm, 0.8mm"
pads (64):
  oval 1.6x0.5 smd: 1(-7.9,6) 2(-7.9,5.2) 3(-7.9,4.4) 4(-7.9,3.6) 5(-7.9,2.8) 6(-7.9,2) 7(-7.9,1.2) 8(-7.9,0.4) 9(-7.9,-0.4) 10(-7.9,-1.2) 11(-7.9,-2) 12(-7.9,-2.8) 13(-7.9,-3.6) 14(-7.9,-4.4) 15(-7.9,-5.2) 16(-7.9,-6) 33(7.9,-6) 34(7.9,-5.2) 35(7.9,-4.4) 36(7.9,-3.6) 37(7.9,-2.8) 38(7.9,-2) 39(7.9,-1.2) 40(7.9,-0.4) 41(7.9,0.4) 42(7.9,1.2) 43(7.9,2) 44(7.9,2.8) 45(7.9,3.6) 46(7.9,4.4) 47(7.9,5.2) 48(7.9,6)
  oval 0.5x1.6 smd: 17(-6,-7.9) 18(-5.2,-7.9) 19(-4.4,-7.9) 20(-3.6,-7.9) 21(-2.8,-7.9) 22(-2,-7.9) 23(-1.2,-7.9) 24(-0.4,-7.9) 25(0.4,-7.9) 26(1.2,-7.9) 27(2,-7.9) 28(2.8,-7.9) 29(3.6,-7.9) 30(4.4,-7.9) 31(5.2,-7.9) 32(6,-7.9) 49(6,7.9) 50(5.2,7.9) 51(4.4,7.9) 52(3.6,7.9) 53(2.8,7.9) 54(2,7.9) 55(1.2,7.9) 56(0.4,7.9) 57(-0.4,7.9) 58(-1.2,7.9) 59(-2,7.9) 60(-2.8,7.9) 61(-3.6,7.9) 62(-4.4,7.9) 63(-5.2,7.9) 64(-6,7.9)
Top Overlay:
  circle w0.2: c-7.9,6.7 r0.2
  circle w0.2: c-6.6,6 r0.2
  lines w0.2: -9.3,-1.2 -8.9,-1.2 ; -7.1,-6.3 -7.1,-7.1 -6.3,-7.1 ; -7.1,6.3 -7.1,7.1 -6.3,7.1 ; -3.6,-9.3 -3.6,-8.9 ; -2.8,8.9 -2.8,9.3 ; 4.4,-9.3 4.4,-8.9 ; 5.2,8.9 5.2,9.3 ; 6.3,-7.1 7.1,-7.1 7.1,-6.3 ; 6.3,7.1 7.1,7.1 7.1,6.3 ; 8.9,-0.4 9.3,-0.4
Top Designator:
  text ".Designator" at -3.71,-0.344 h1.52
3D body "User Library-atmega64 (tqfp64).step": height 1.1, standoff -0.01, extent -8,-8 8,8

## QFN16 [mm] "4mm * 4mm 16 Pin QFN Package"
pads (17):
  rrect25% 1.01x0.32 smd: 1(-1.86,0.975) 2(-1.86,0.325) 3(-1.86,-0.325) 4(-1.86,-0.975) 9(1.86,-0.975) 10(1.86,-0.325) 11(1.86,0.325) 12(1.86,0.975)
  rrect25% 0.32x1.01 smd: 5(-0.975,-1.86) 6(-0.325,-1.86) 7(0.325,-1.86) 8(0.975,-1.86) 13(0.975,1.86) 14(0.325,1.86) 15(-0.325,1.86) 16(-0.975,1.86)
  rect 2.1x2.1 smd paste-0.39: 17(0,0)
Top Overlay:
  circle w0.2: c-3.07,0.975 r0.1
  lines w0.127: -2,-1.455 -2,-2 -1.455,-2 ; -2,1.455 -2,2 -1.455,2 ; 1.455,-2 2,-2 2,-1.455 ; 1.455,2 2,2 2,1.455
Mechanical 13:
  circle w0.2: c-3.07,0.975 r0.1
  lines w0.127: -2,-2 -2,2 2,2 2,-2 -2,-2
3D body "step_temp.STEP": height 0.9, standoff 0, extent -2,-2 2,2

## QFN35_48T_5X5 [mm] "QFN, 0.35mm pitch, 5x5mm"
height 0.9
pads (49):
  oval 0.8x0.15 smd mask+0.05: 1(-2.5,1.925) 2(-2.5,1.575) 3(-2.5,1.225) 4(-2.5,0.875) 5(-2.5,0.525) 6(-2.5,0.175) 7(-2.5,-0.175) 8(-2.5,-0.525) 9(-2.5,-0.875) 10(-2.5,-1.225) 11(-2.5,-1.575) 12(-2.5,-1.925) 25(2.5,-1.925) 26(2.5,-1.575) 27(2.5,-1.225) 28(2.5,-0.875) 29(2.5,-0.525) 30(2.5,-0.175) 31(2.5,0.175) 32(2.5,0.525) 33(2.5,0.875) 34(2.5,1.225) 35(2.5,1.575) 36(2.5,1.925)
  oval 0.15x0.8 smd mask+0.05: 13(-1.925,-2.5) 14(-1.575,-2.5) 15(-1.225,-2.5) 16(-0.875,-2.5) 17(-0.525,-2.5) 18(-0.175,-2.5) 19(0.175,-2.5) 20(0.525,-2.5) 21(0.875,-2.5) 22(1.225,-2.5) 23(1.575,-2.5) 24(1.925,-2.5) 37(1.925,2.5) 38(1.575,2.5) 39(1.225,2.5) 40(0.875,2.5) 41(0.525,2.5) 42(0.175,2.5) 43(-0.175,2.5) 44(-0.525,2.5) 45(-0.875,2.5) 46(-1.225,2.5) 47(-1.575,2.5) 48(-1.925,2.5)
  rect 3.7x3.7 smd paste-10 mask+0.05: 49(0,0)
Top Overlay:
  circle w0.2: c-3.1,2.3 r0.1
  lines w0.2: -2.6,-2.2 -2.6,-2.6 -2.2,-2.6 ; -2.6,2.2 -2.6,2.6 -2.2,2.6 ; 2.2,-2.6 2.6,-2.6 2.6,-2.2 ; 2.2,2.6 2.6,2.6 2.6,2.2
Top Paste:
  rectangle: -1.6,0.2 -0.2,1.6
  region: 1.6,1.6 0.2,1.6 0.2,0.2 1.6,0.2
  region: 1.6,-0.2 0.2,-0.2 0.2,-1.6 1.6,-1.6
  rectangle: -1.6,-1.6 -0.2,-0.2
Top Designator:
  text ".Designator" at -3.885,-0.344 h1.52
Mechanical 13:
  circle w0.1: c-1.6,1.6 r0.5
  lines w0.1: -2.5,-2.5 -2.5,2.5 2.5,2.5 2.5,-2.5 -2.5,-2.5
3D body "QFN35_48T.step": height 0.9, standoff 0, extent -2.501,-2.501 2.501,2.501

## QFN35_68T [mm] "QFN, 68-Leads, 7x7mm, Pitch 0.35mm,"
height 0.8
pads (69):
  oval 0.8x0.15 smd mask+0.05: 1(-3.4,2.8) 2(-3.4,2.45) 3(-3.4,2.1) 4(-3.4,1.75) 5(-3.4,1.4) 6(-3.4,1.05) 7(-3.4,0.7) 8(-3.4,0.35) 9(-3.4,0) 10(-3.4,-0.35) 11(-3.4,-0.7) 12(-3.4,-1.05) 13(-3.4,-1.4) 14(-3.4,-1.75) 15(-3.4,-2.1) 16(-3.4,-2.45) 17(-3.4,-2.8) 35(3.4,-2.8) 36(3.4,-2.45) 37(3.4,-2.1) 38(3.4,-1.75) 39(3.4,-1.4) 40(3.4,-1.05) 41(3.4,-0.7) 42(3.4,-0.35) 43(3.4,0) 44(3.4,0.35) 45(3.4,0.7) 46(3.4,1.05) 47(3.4,1.4) 48(3.4,1.75) 49(3.4,2.1) 50(3.4,2.45) 51(3.4,2.8)
  oval 0.15x0.8 smd mask+0.05: 18(-2.8,-3.4) 19(-2.45,-3.4) 20(-2.1,-3.4) 21(-1.75,-3.4) 22(-1.4,-3.4) 23(-1.05,-3.4) 24(-0.7,-3.4) 25(-0.35,-3.4) 26(0,-3.4) 27(0.35,-3.4) 28(0.7,-3.4) 29(1.05,-3.4) 30(1.4,-3.4) 31(1.75,-3.4) 32(2.1,-3.4) 33(2.45,-3.4) 34(2.8,-3.4) 52(2.8,3.4) 53(2.45,3.4) 54(2.1,3.4) 55(1.75,3.4) 56(1.4,3.4) 57(1.05,3.4) 58(0.7,3.4) 59(0.35,3.4) 60(0,3.4) 61(-0.35,3.4) 62(-0.7,3.4) 63(-1.05,3.4) 64(-1.4,3.4) 65(-1.75,3.4) 66(-2.1,3.4) 67(-2.45,3.4) 68(-2.8,3.4)
  rect 5.5x5.5 smd paste-6 mask+0.05: 69(0,0)
Top Overlay:
  circle w0.2: c-4.1,3.5 r0.1
  lines w0.2: -3.6,-3.1 -3.6,-3.6 -3.1,-3.6 ; -3.6,3.1 -3.6,3.6 -3.1,3.6 ; 3.1,-3.6 3.6,-3.6 3.6,-3.1 ; 3.1,3.6 3.6,3.6 3.6,3.1
Top Paste:
  rectangle: -1.2,0.2 -0.2,1.2
  rectangle: -2.6,1.6 -1.6,2.6
  region: -0.2,2.6 -1.2,2.6 -1.2,1.6 -0.2,1.6
  rectangle: -2.6,0.2 -1.6,1.2
  region: 2.6,1.2 1.6,1.2 1.6,0.2 2.6,0.2
  rectangle: 0.2,1.6 1.2,2.6
  region: 2.6,2.6 1.6,2.6 1.6,1.6 2.6,1.6
  region: 1.2,1.2 0.2,1.2 0.2,0.2 1.2,0.2
  region: 1.2,-0.2 0.2,-0.2 0.2,-1.2 1.2,-1.2
  region: 2.6,-1.6 1.6,-1.6 1.6,-2.6 2.6,-2.6
  rectangle: 0.2,-2.6 1.2,-1.6
  region: 2.6,-0.2 1.6,-0.2 1.6,-1.2 2.6,-1.2
  rectangle: -2.6,-1.2 -1.6,-0.2
  region: -0.2,-1.6 -1.2,-1.6 -1.2,-2.6 -0.2,-2.6
  rectangle: -2.6,-2.6 -1.6,-1.6
  rectangle: -1.2,-1.2 -0.2,-0.2
Top Designator:
  text ".Designator" at -3.935,-0.344 h1.52
Mechanical 13:
  circle w0.1: c-2.6,2.6 r0.5
  lines w0.1: -3.5,-3.5 -3.5,3.5 3.5,3.5 3.5,-3.5 -3.5,-3.5
3D body "QFN35_68T.step": height 0.8, standoff 0, extent -3.501,-3.501 3.501,3.501

## QFN35_68TA [mm] "QFN, 68-Leads, 7x7mm, Pitch 0.35mm, for PCBA"
height 0.8
pads (70):
  oval 0.6x0.15 smd mask+0.05: 1(-3.4,2.8) 2(-3.4,2.45) 3(-3.4,2.1) 4(-3.4,1.75) 5(-3.4,1.4) 6(-3.4,1.05) 7(-3.4,0.7) 8(-3.4,0.35) 9(-3.4,0) 10(-3.4,-0.35) 11(-3.4,-0.7) 12(-3.4,-1.05) 13(-3.4,-1.4) 14(-3.4,-1.75) 15(-3.4,-2.1) 16(-3.4,-2.45) 17(-3.4,-2.8) 35(3.4,-2.8) 36(3.4,-2.45) 37(3.4,-2.1) 38(3.4,-1.75) 39(3.4,-1.4) 40(3.4,-1.05) 41(3.4,-0.7) 42(3.4,-0.35) 43(3.4,0) 44(3.4,0.35) 45(3.4,0.7) 46(3.4,1.05) 47(3.4,1.4) 48(3.4,1.75) 49(3.4,2.1) 50(3.4,2.45) 51(3.4,2.8)
  oval 0.15x0.6 smd mask+0.05: 18(-2.8,-3.4) 19(-2.45,-3.4) 20(-2.1,-3.4) 21(-1.75,-3.4) 22(-1.4,-3.4) 23(-1.05,-3.4) 24(-0.7,-3.4) 25(-0.35,-3.4) 26(0,-3.4) 27(0.35,-3.4) 28(0.7,-3.4) 29(1.05,-3.4) 30(1.4,-3.4) 31(1.75,-3.4) 32(2.1,-3.4) 33(2.45,-3.4) 34(2.8,-3.4) 52(2.8,3.4) 53(2.45,3.4) 54(2.1,3.4) 55(1.75,3.4) 56(1.4,3.4) 57(1.05,3.4) 58(0.7,3.4) 59(0.35,3.4) 60(0,3.4) 61(-0.35,3.4) 62(-0.7,3.4) 63(-1.05,3.4) 64(-1.4,3.4) 65(-1.75,3.4) 66(-2.1,3.4) 67(-2.45,3.4) 68(-2.8,3.4)
  rect 5.5x5.5 smd paste-6 mask+0.05: 69(0,0) 69(0,0)
Top Overlay:
  circle w0.2: c-4.1,3.5 r0.1
  lines w0.2: -3.6,-3.1 -3.6,-3.6 -3.1,-3.6 ; -3.6,3.1 -3.6,3.6 -3.1,3.6 ; 3.1,-3.6 3.6,-3.6 3.6,-3.1 ; 3.1,3.6 3.6,3.6 3.6,3.1
Top Paste:
  rectangle: -1.2,-1.2 -0.2,-0.2
  rectangle: -2.6,-2.6 -1.6,-1.6
  region: -0.2,-1.6 -1.2,-1.6 -1.2,-2.6 -0.2,-2.6
  rectangle: -2.6,-1.2 -1.6,-0.2
  region: 2.6,-0.2 1.6,-0.2 1.6,-1.2 2.6,-1.2
  rectangle: 0.2,-2.6 1.2,-1.6
  region: 2.6,-1.6 1.6,-1.6 1.6,-2.6 2.6,-2.6
  region: 1.2,-0.2 0.2,-0.2 0.2,-1.2 1.2,-1.2
  region: 1.2,1.2 0.2,1.2 0.2,0.2 1.2,0.2
  region: 2.6,2.6 1.6,2.6 1.6,1.6 2.6,1.6
  rectangle: 0.2,1.6 1.2,2.6
  region: 2.6,1.2 1.6,1.2 1.6,0.2 2.6,0.2
  rectangle: -2.6,0.2 -1.6,1.2
  region: -0.2,2.6 -1.2,2.6 -1.2,1.6 -0.2,1.6
  rectangle: -2.6,1.6 -1.6,2.6
  rectangle: -1.2,0.2 -0.2,1.2
Top Designator:
  text ".Designator" at -3.985,-0.344 h1.52
Mechanical 13:
  circle w0.1: c-2.6,2.6 r0.5
  lines w0.1: -3.5,-3.5 3.5,-3.5 3.5,3.5 -3.5,3.5 -3.5,-3.5
3D body "QFN35_68T.step": height 0.8, standoff 0, extent -3.501,-3.501 3.501,3.501

## QFN40_10_1316 [mm] "QFN, 10, 1.3X1.6mm, 0.4mm, LFCSP, CP-10-10"
height 0.5
pads (10):
  oval 0.8x0.2 smd mask+0.05: 1(-0.6,0.2) 2(-0.6,-0.2) 6(0.6,-0.2) 7(0.6,0.2)
  oval 0.2x0.8 smd mask+0.05: 3(-0.4,-0.9) 4(0,-0.9) 5(0.4,-0.9) 8(0.4,0.9) 9(0,0.9) 10(-0.4,0.9)
Top Overlay:
  circle w0.2: c-1.1,0.6 r0.1
  region: 0.8,0.95 0.65,0.95 0.65,0.35 0.8,0.35
  region: 0.8,0.95 0.55,0.95 0.55,0.8 0.8,0.8
  region: 0.8,-0.8 0.55,-0.8 0.55,-0.95 0.8,-0.95
  region: 0.8,-0.35 0.65,-0.35 0.65,-0.95 0.8,-0.95
  rectangle: -0.8,-0.95 -0.65,-0.35
  rectangle: -0.8,-0.95 -0.55,-0.8
  rectangle: -0.8,0.8 -0.55,0.95
  rectangle: -0.8,0.35 -0.65,0.95
Top Designator:
  text ".Designator" at -3.835,-0.344 h1.52
Mechanical 13:
  circle w0.1: c-0.3,0.4 r0.2
3D body "User Library-LFCSP-10.step": height 0.55, standoff 0, extent -0.65,-0.8 0.65,0.8